# Altium footprint library WE-RJ45 LAN.PcbLib: 106 footprints (part 5 of 7)
Each footprint in its own frame and in the unit in brackets; x right, y up, seen from the top. Pads: shape width x height; smd on the part's side, far side on the other; paste and mask are expansions set on the pad; w line width, h text height; cw(c..) or ccw(c..) is an arc to the next point about the centre after c.
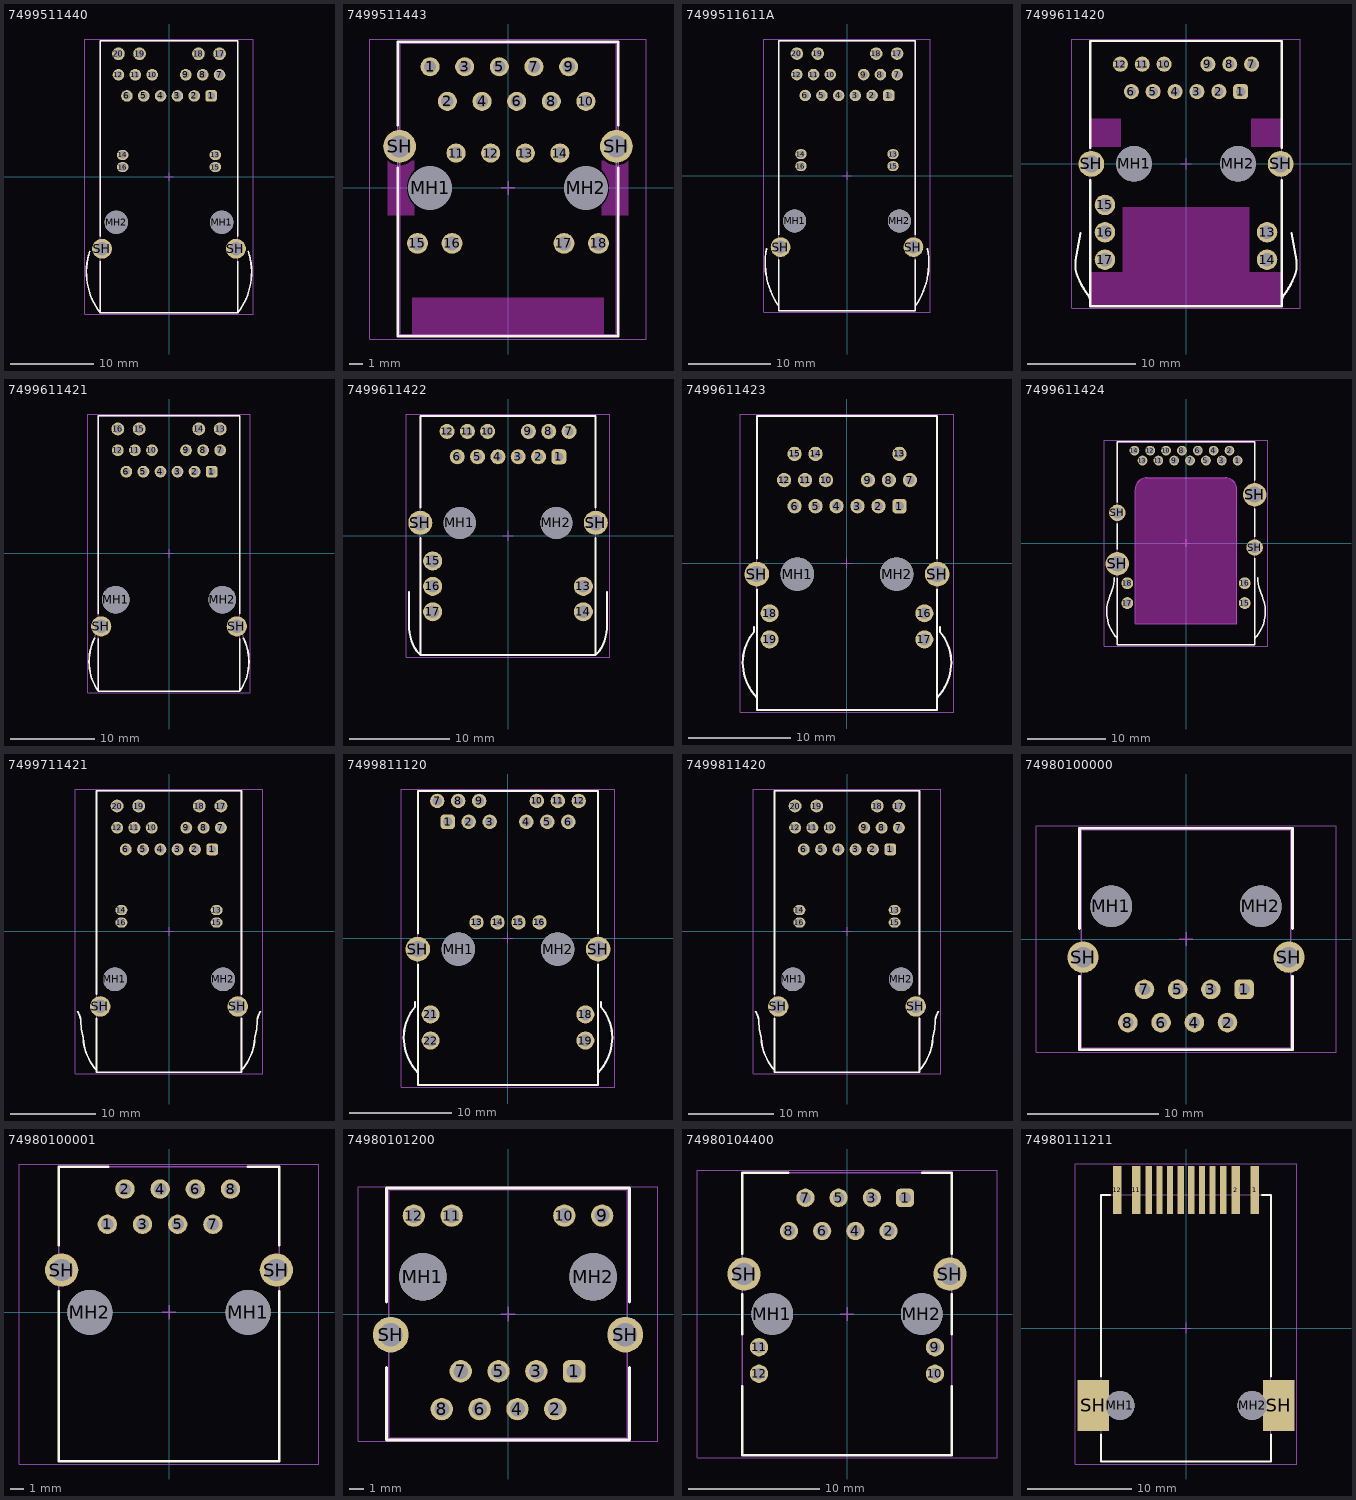
[diagram p4: the footprints below, top view; thin cyan lines are the x and y axes]

## 7499511440 [mm] "LAN Transformer, body 33.02x17mm"
height 13.87
pads (24):
  rrect50% 1.4x1.4 hole 0.9: 1(5.075,9.74)
  round 1.4 hole 0.9: 2(3.045,9.74) 3(1.015,9.74) 4(-1.015,9.74) 5(-3.045,9.74) 6(-5.075,9.74) 7(6.09,12.28) 8(4.06,12.28) 9(2.03,12.28) 10(-2.03,12.28) 11(-4.06,12.28) 12(-6.09,12.28)
  oval 1.4x1.2 hole 0.9: 13(5.59,2.62) 14(-5.59,2.62) 15(5.59,1.16) 16(-5.59,1.16)
  round 1.52 hole 1.03: 17(6.09,14.82) 18(3.55,14.82) 19(-3.55,14.82) 20(-6.09,14.82)
  round 2.8 hole 2.8 unplated: MH1(6.35,-5.5) MH2(-6.35,-5.5)
  round 2.4 hole 1.6: SH(-8.065,-8.68) SH(8.065,-8.68)
Top Overlay:
  lines w0.2: -9.557,-8.983 ccw(c-1.9,-11.5) -8.3,-16.4 ; -8.3,-10.2 -8.3,-16.4 ; -8.3,-7.16 -8.3,16.4 8.3,16.4 8.3,-7.16 ; 8.3,-10.2 8.3,-16.4 ; 9.557,-8.983 cw(c1.9,-11.5) 8.3,-16.4 ; -8.3,-16.4 8.3,-16.4
Top Assembly:
  lines w0.1: -9.557,-8.983 ccw(c-1.9,-11.5) -8.3,-16.4 ; 9.557,-8.983 cw(c1.9,-11.5) 8.3,-16.4 ; -8.3,-16.4 8.3,-16.4 ; -8.3,-16.4 -8.3,16.4 8.3,16.4 8.3,-16.4
Top Designator:
  text ".Designator" at -3.647,-0.357 h1
Top 3D Body:
  lines w0.1: -9.557,-8.983 ccw(c-1.9,-11.5) -8.3,-16.4 ; 9.557,-8.983 cw(c1.9,-11.5) 8.3,-16.4 ; -8.3,-16.4 8.3,-16.4 ; -8.3,-16.4 -8.3,16.4 8.3,16.4 8.3,-16.4
Top Courtyard:
  lines w0.05: -10.15,-16.6 -10.15,16.6 10.15,16.6 10.15,-16.6 -10.15,-16.6
Top Component Center:
  lines w0.1: -0.5,0 0.5,0 ; 0,-0.5 0,0.5
3D body "7499511440.stp": height 15.3, standoff -3.64, extent -9.95,-16.4 9.95,16.4

## 7499511443 [mm] "Integrated RJ45 Transformer, THT, body 15.90 x 21.35mm"
height 13.5
pads (22):
  round 1.4 hole 0.9: 1(-5.715,8.89) 2(-4.445,6.35) 3(-3.175,8.89) 4(-1.905,6.35) 5(-0.635,8.89) 6(0.635,6.35) 7(1.905,8.89) 8(3.175,6.35) 9(4.445,8.89) 10(5.715,6.35) 11(-3.81,2.56) 12(-1.27,2.56) 13(1.27,2.56) 14(3.81,2.56)
  round 1.53 hole 1.02: 15(-6.64,-4.06) 16(-4.1,-4.06) 17(4.1,-4.06) 18(6.64,-4.06)
  round 3.15 hole 3.25 unplated: MH1(-5.715,0) MH2(5.715,0)
  round 2.4 hole 1.6: SH(-7.95,3.05) SH(7.95,3.05)
Top Layer keep-out:
  region: 8.825,-2 8.825,2 8.735,1.918 8.533,1.784 8.309,1.691 8.071,1.644 7.829,1.644 7.591,1.691 7.367,1.784 7.165,1.918 7.075,2 6.875,2 6.875,1.35 7.001,1.211 7.209,0.9 7.352,0.554 7.425,0.187 7.425,-0.187 7.352,-0.554 7.209,-0.9 7.001,-1.211 6.875,-1.35 6.875,-2
  region: -8.825,-2 -8.825,2 -8.735,1.918 -8.533,1.784 -8.309,1.691 -8.071,1.644 -7.829,1.644 -7.591,1.691 -7.367,1.784 -7.165,1.918 -7.075,2 -6.875,2 -6.875,1.35 -7.001,1.211 -7.209,0.9 -7.352,0.554 -7.425,0.187 -7.425,-0.187 -7.352,-0.554 -7.209,-0.9 -7.001,-1.211 -6.875,-1.35 -6.875,-2
  region: -7.005,-10.75 7.005,-10.75 7.005,-8.05 -7.005,-8.05
Top Overlay:
  lines w0.2: -8.075,1.475 -8.075,-10.875 8.075,-10.875 8.075,1.475 ; -8.075,4.625 -8.075,10.725 8.075,10.725 8.075,4.625
Top Assembly:
  lines w0.1: -8.075,-10.875 8.075,-10.875 8.075,10.725 -8.075,10.725 -8.075,-10.875
Top Designator:
  text ".Designator" at -3.647,-0.357 h1
Top 3D Body:
  lines w0.1: -7.95,-10.75 -7.95,10.6 7.95,10.6 7.95,-10.75 -7.95,-10.75
Top Courtyard:
  lines w0.05: -10.151,-11.075 10.151,-11.075 10.151,10.925 -10.151,10.925 -10.151,-11.075
Top Component Center:
  lines w0.1: -0.5,0 0.5,0 ; 0,-0.5 0,0.5
3D body "7499511443.stp": height 15.65, standoff -3.78, extent -9.951,-11.001 9.951,10.6

## 7499511611A [mm] "LAN Transformer, body 33.02x17mm"
height 13.87
pads (24):
  rrect50% 1.4x1.4 hole 0.9: 1(5.075,9.74)
  round 1.4 hole 0.9: 2(3.045,9.74) 3(1.015,9.74) 4(-1.015,9.74) 5(-3.045,9.74) 6(-5.075,9.74) 7(6.09,12.28) 8(4.06,12.28) 9(2.03,12.28) 10(-2.03,12.28) 11(-4.06,12.28) 12(-6.09,12.28)
  oval 1.4x1.2 hole 0.9: 13(5.59,2.62) 14(-5.59,2.62) 15(5.59,1.16) 16(-5.59,1.16)
  round 1.52 hole 1.03: 17(6.09,14.82) 18(3.55,14.82) 19(-3.55,14.82) 20(-6.09,14.82)
  round 2.8 hole 2.8 unplated: MH1(-6.35,-5.5) MH2(6.35,-5.5)
  round 2.4 hole 1.6: SH(-8.065,-8.68) SH(8.065,-8.68)
Top Overlay:
  lines w0.2: -9.777,-8.886 ccw(c-0.7,-10.6) -8.3,-15.85 ; -8.3,-10.2 -8.3,-16.4 8.3,-16.4 8.3,-10.2 ; -8.3,-7.16 -8.3,16.4 8.3,16.4 8.3,-7.16 ; 8.3,-15.85 ccw(c0.7,-10.6) 9.777,-8.886
Top Assembly:
  lines w0.1: -9.777,-8.886 ccw(c-0.7,-10.6) -8.3,-15.85 ; 8.3,-15.85 ccw(c0.7,-10.6) 9.777,-8.886 ; -8.3,-16.4 -8.3,16.4 8.3,16.4 8.3,-16.4 -8.3,-16.4
Top Designator:
  text ".Designator" at -3.647,-0.357 h1
Top 3D Body:
  lines w0.1: -9.777,-8.886 ccw(c-0.7,-10.6) -8.3,-15.85 ; 8.3,-15.85 ccw(c0.7,-10.6) 9.777,-8.886 ; -8.3,-16.4 -8.3,16.4 8.3,16.4 8.3,-16.4 -8.3,-16.4
Top Courtyard:
  lines w0.05: -10.115,-16.6 10.115,-16.6 10.115,16.6 -10.115,16.6 -10.115,-16.6
Top Component Center:
  lines w0.1: -0.5,0 0.5,0 ; 0,-0.5 0,0.5
3D body "7499511611A.stp": height 15.25, standoff -3.79, extent -9.915,-16.4 9.915,16.4

## 7499611420 [mm] "10/100/1000/10G Base-T, THT, 1x1, Tab up, with shield tabs, with LED L-R yellow/green-green"
height 11.3
pads (21):
  rrect50% 1.4x1.4 hole 0.89: 1(5.075,6.71)
  round 1.4 hole 0.89: 2(3.045,6.71) 3(1.015,6.71) 4(-1.015,6.71) 5(-3.045,6.71) 6(-5.075,6.71) 7(6.09,9.25) 8(4.06,9.25) 9(2.03,9.25) 10(-2.03,9.25) 11(-4.06,9.25) 12(-6.09,9.25)
  round 1.9 hole 1.27: 13(7.52,-6.35) 14(7.52,-8.89) 15(-7.52,-3.81) 16(-7.52,-6.35) 17(-7.52,-8.89)
  round 3.3 hole 3.3 unplated: MH1(-4.825,0) MH2(4.825,0)
  round 2.4 hole 1.57: SH(-8.79,0) SH(8.79,0)
Top Overlay:
  lines w0.2: -9.803,-6.408 -10.253,-8.957 ccw(c-3.459,-9.443) -10.261,-9.802 ccw(c-3.781,-8.079) -9.271,-11.929 cw(c-10.549,-13.09) -8.89,-12.61 ; -8.89,-1.51 -8.89,-13.21 8.89,-13.21 8.89,-1.51 ; -8.89,1.49 -8.89,11.39 8.89,11.39 8.89,1.49 ; 8.89,-12.61 cw(c10.549,-13.09) 9.271,-11.929 ccw(c3.781,-8.079) 10.261,-9.802 ccw(c3.459,-9.443) 10.253,-8.957 9.803,-6.408
Keep-Out Layer:
  region: -5.88,-4.01 5.88,-4.01 5.88,-10.04 8.89,-10.04 8.89,-13.21 -8.89,-13.21 -8.89,-10.04 -5.88,-10.04
  region: -8.89,4.2 -6.075,4.2 -6.075,1.59 -8.89,1.59
  region: 8.89,4.2 6.075,4.2 6.075,1.59 8.89,1.59
Top Assembly:
  lines w0.1: -9.803,-6.408 -10.253,-8.957 ccw(c-3.459,-9.443) -10.261,-9.802 ccw(c-3.781,-8.079) -9.271,-11.929 cw(c-10.549,-13.09) -8.89,-12.61 ; 8.89,-12.61 cw(c10.549,-13.09) 9.271,-11.929 ccw(c3.781,-8.079) 10.261,-9.802 ccw(c3.459,-9.443) 10.253,-8.957 9.803,-6.408 ; -8.89,-13.21 -8.89,11.39 8.89,11.39 8.89,-13.21 -8.89,-13.21
Top Designator:
  text ".Designator" at -3.647,-0.357 h1
Top 3D Body:
  lines w0.1: -9.803,-6.408 -10.253,-8.957 ccw(c-3.459,-9.443) -10.261,-9.802 ccw(c-3.781,-8.079) -9.271,-11.929 cw(c-10.549,-13.09) -8.89,-12.61 ; 8.89,-12.61 cw(c10.549,-13.09) 9.271,-11.929 ccw(c3.781,-8.079) 10.261,-9.802 ccw(c3.459,-9.443) 10.253,-8.957 9.803,-6.408 ; -8.89,-13.21 -8.89,11.39 8.89,11.39 8.89,-13.21 -8.89,-13.21
Top Courtyard:
  lines w0.05: -10.587,-13.41 -10.587,11.59 10.587,11.59 10.587,-13.41 -10.587,-13.41
Top Component Center:
  lines w0.1: -0.5,0 0.5,0 ; 0,-0.5 0,0.5
3D body "7499611420.stp": height 12.85, standoff -3.25, extent -10.387,-13.21 10.387,11.39

## 7499611421 [mm] "10/100/1000/10G Base-T, THT, 1x1, Tab up, with shield tabs, with LED L-R yellow/green-green"
height 13.87
pads (20):
  rrect50% 1.4x1.4 hole 0.9: 1(5.075,9.73)
  round 1.4 hole 0.9: 2(3.045,9.73) 3(1.015,9.73) 4(-1.015,9.73) 5(-3.045,9.73) 6(-5.075,9.73) 7(6.09,12.27) 8(4.06,12.27) 9(2.03,12.27) 10(-2.03,12.27) 11(-4.06,12.27) 12(-6.09,12.27)
  round 1.53 hole 1.03: 13(6.09,14.81) 14(3.55,14.81) 15(-3.55,14.81) 16(-6.09,14.81)
  round 3.3 hole 3.3 unplated: MH1(-6.35,-5.51) MH2(6.35,-5.51)
  round 2.4 hole 1.6: SH(-8.065,-8.69) SH(8.065,-8.69)
Top Overlay:
  lines w0.2: -8.878,-10.135 ccw(c-3.287,-12.887) -8.435,-16.4 ; -8.435,-10.2 -8.435,-16.4 ; -8.435,-7.18 -8.435,16.4 8.435,16.4 8.435,-7.18 ; 8.435,-10.2 8.435,-16.4 ; 8.878,-10.135 cw(c3.287,-12.887) 8.435,-16.4 ; -8.435,-16.4 8.435,-16.4
Top Assembly:
  lines w0.1: -8.792,-9.075 cw(c-10.078,-9.504) -8.878,-10.135 ccw(c-3.287,-12.887) -8.435,-16.4 ; 8.792,-9.075 ccw(c10.078,-9.504) 8.878,-10.135 cw(c3.287,-12.887) 8.435,-16.4 ; -8.435,-16.4 -8.435,16.4 8.435,16.4 8.435,-16.4 ; -8.435,-16.4 8.435,-16.4
Top Designator:
  text ".Designator" at -3.647,-0.357 h1
Top 3D Body:
  lines w0.1: -8.792,-9.075 cw(c-10.078,-9.504) -8.878,-10.135 ccw(c-3.287,-12.887) -8.435,-16.4 ; 8.792,-9.075 ccw(c10.078,-9.504) 8.878,-10.135 cw(c3.287,-12.887) 8.435,-16.4 ; -8.435,-16.4 -8.435,16.4 8.435,16.4 8.435,-16.4 ; -8.435,-16.4 8.435,-16.4
Top Courtyard:
  lines w0.05: -9.7,-16.6 -9.7,16.59 9.7,16.59 9.7,-16.6 -9.7,-16.6
Top Component Center:
  lines w0.1: -0.5,0 0.5,0 ; 0,-0.5 0,0.5
3D body "7499611421.stp": height 15, standoff -3.3, extent -9.5,-16.4 9.5,16.4

## 7499611422 [mm] "10/100/1000/10G Base-T, THT, 1x1, Tab down, with shield tabs, with LED L-R yellow/green-green"
height 11.3
pads (21):
  rrect50% 1.5x1.5 hole 0.89: 1(5.08,7.87)
  round 1.5 hole 0.89: 2(3.05,7.87) 3(1.02,7.87) 4(-1.01,7.87) 5(-3.04,7.87) 6(-5.07,7.87) 7(6.1,10.41) 8(4.07,10.41) 9(2.04,10.41) 10(-2.03,10.41) 11(-4.06,10.41) 12(-6.09,10.41)
  round 1.9 hole 1.27: 13(7.525,-5.08) 14(7.525,-7.62) 15(-7.525,-2.54) 16(-7.525,-5.08) 17(-7.525,-7.62)
  round 3.2 hole 3.2 unplated: MH1(-4.82,1.27) MH2(4.83,1.27)
  round 2.4 hole 1.57: SH(-8.76,1.27) SH(8.77,1.27)
Top Overlay:
  lines w0.2: -9.893,-5.63 -9.893,-8.873 ccw(c-0.53,-8.455) -9.754,-10.12 ccw(c-6.826,-9.484) -9.537,-10.758 ccw(c-6.85,-9.827) -8.765,-11.93 ; -8.765,-0.26 -8.765,-11.94 8.765,-11.94 8.765,-0.26 ; -8.765,2.8 -8.765,11.94 8.765,11.94 8.765,2.8 ; 8.765,-11.93 ccw(c6.85,-9.827) 9.537,-10.758 ccw(c6.826,-9.484) 9.754,-10.12 ccw(c0.53,-8.455) 9.893,-8.873 9.893,-5.63
Top Assembly:
  lines w0.1: -9.893,-5.63 -9.893,-8.873 ccw(c-0.53,-8.455) -9.754,-10.12 ccw(c-6.826,-9.484) -9.537,-10.758 ccw(c-6.85,-9.827) -8.765,-11.93 ; 8.765,-11.93 ccw(c6.85,-9.827) 9.537,-10.758 ccw(c6.826,-9.484) 9.754,-10.12 ccw(c0.53,-8.455) 9.893,-8.873 9.893,-5.63 ; -8.765,-11.94 8.765,-11.94 8.765,11.94 -8.765,11.94 -8.765,-11.94
Top Designator:
  text ".Designator" at -3.647,-0.357 h1
Top 3D Body:
  lines w0.1: -9.893,-5.63 -9.893,-8.873 ccw(c-0.53,-8.455) -9.754,-10.12 ccw(c-6.826,-9.484) -9.537,-10.758 ccw(c-6.85,-9.827) -8.765,-11.93 ; 8.765,-11.93 ccw(c6.85,-9.827) 9.537,-10.758 ccw(c6.826,-9.484) 9.754,-10.12 ccw(c0.53,-8.455) 9.893,-8.873 9.893,-5.63 ; -8.765,-11.94 8.765,-11.94 8.765,11.94 -8.765,11.94 -8.765,-11.94
Top Courtyard:
  lines w0.05: -10.16,-12.14 10.16,-12.14 10.16,12.14 -10.16,12.14 -10.16,-12.14
Top Component Center:
  lines w0.1: -0.5,0 0.5,0 ; 0,-0.5 0,0.5
3D body "7499611422.stp": height 12.5, standoff -3.2, extent -9.965,-11.94 9.965,11.94

## 7499611423 [mm] "10/100/1000/10G Base-T, THT, 1x1, Tab down, with shield tabs, with LED L/R yellow-green/green, ETR"
height 11.92
pads (23):
  rrect50% 1.4x1.4 hole 0.9: 1(5.1,5.525)
  round 1.4 hole 0.9: 2(3.06,5.525) 3(1.02,5.525) 4(-1.02,5.525) 5(-3.06,5.525) 6(-5.1,5.525) 7(6.12,8.065) 8(4.08,8.065) 9(2.04,8.065) 10(-2.04,8.065) 11(-4.08,8.065) 12(-6.12,8.065) 13(5.1,10.605) 14(-3.06,10.605) 15(-5.1,10.605)
  round 1.75 hole 1.14: 16(7.52,-4.885) 17(7.52,-7.425) 18(-7.52,-4.885) 19(-7.52,-7.425)
  round 3.25 hole 3.25 unplated: MH1(-4.825,-1.075) MH2(4.825,-1.075)
  round 2.4 hole 1.57: SH(-8.765,-1.075) SH(8.765,-1.075)
Top Overlay:
  lines w0.2: -9.024,-6.204 -9.024,-6.677 ccw(c-5.614,-9.65) -10.075,-10.404 ccw(c-5.089,-9.628) -8.765,-13.085 ; -8.765,-2.6 -8.765,-14.285 8.765,-14.285 8.765,-2.6 ; -8.765,0.45 -8.765,14.285 8.765,14.285 8.765,0.45 ; 8.765,-13.085 ccw(c5.089,-9.628) 10.075,-10.404 ccw(c5.614,-9.65) 9.024,-6.677 9.024,-6.204
Top Assembly:
  lines w0.1: -9.024,-6.204 -9.024,-6.677 ccw(c-5.614,-9.65) -10.075,-10.404 ccw(c-5.089,-9.628) -8.765,-13.085 ; 8.765,-13.085 ccw(c5.089,-9.628) 10.075,-10.404 ccw(c5.614,-9.65) 9.024,-6.677 9.024,-6.204 ; -8.765,-14.285 -8.765,14.285 8.765,14.285 8.765,-14.285 -8.765,-14.285
Top Designator:
  text ".Designator" at -3.647,-0.357 h1
Top 3D Body:
  lines w0.1: -9.024,-6.204 -9.024,-6.677 ccw(c-5.614,-9.65) -10.075,-10.404 ccw(c-5.089,-9.628) -8.765,-13.085 ; 8.765,-13.085 ccw(c5.089,-9.628) 10.075,-10.404 ccw(c5.614,-9.65) 9.024,-6.677 9.024,-6.204 ; -8.765,-14.285 -8.765,14.285 8.765,14.285 8.765,-14.285 -8.765,-14.285
Top Courtyard:
  lines w0.05: -10.363,-14.485 -10.363,14.485 10.363,14.485 10.363,-14.485 -10.363,-14.485
Top Component Center:
  lines w0.1: -0.5,0 0.5,0 ; 0,-0.5 0,0.5
3D body "7499611423.stp": height 13.4, standoff -3.73, extent -10.163,-14.285 10.163,14.285

## 7499611424 [mm] "10/100/1000/10G Base-T, THT, 1x1, Tab up, with shield tabs, with LED L/R yellow-green/green, sink type, ETR"
height 11.3
pads (22):
  round 1.25 hole 0.91: 1(6.61,10.57) 2(5.57,11.84) 3(4.58,10.57) 4(3.54,11.84) 5(2.55,10.57) 6(1.51,11.84) 7(0.52,10.57) 8(-0.52,11.84) 9(-1.51,10.57) 10(-2.55,11.84) 11(-3.54,10.57) 12(-4.58,11.84) 13(-5.57,10.57) 14(-6.61,11.84)
  round 1.52 hole 1.02: 15(7.52,-7.67) 16(7.52,-5.13) 17(-7.52,-7.67) 18(-7.52,-5.13)
  round 3 hole 2.03: SH(-8.79,-2.64) SH(8.79,6.21)
  round 2.1 hole 1.4: SH(-8.79,3.88) SH(8.79,-0.56)
Top Overlay:
  lines w0.2: -9.166,-4.434 cw(c-14.185,-4.348) -9.562,-6.303 ccw(c-1.44,-9.726) -9.901,-7.256 ccw(c-5.639,-8.775) -10.1,-9.529 ccw(c-5.114,-8.753) -8.79,-12.21 ; -8.79,-4.5 -8.79,-13 8.79,-13 8.79,-1.95 ; -8.79,-0.78 -8.79,2.5 ; -8.79,5.26 -8.79,13 8.79,13 8.79,8.05 ; 8.79,-12.21 ccw(c5.114,-8.753) 10.1,-9.529 ccw(c5.639,-8.775) 9.901,-7.256 ccw(c1.44,-9.726) 9.562,-6.303 cw(c14.185,-4.348) 9.166,-4.434 ; 8.79,0.85 8.79,4.37
Keep-Out Layer:
  board cut-out: -6.5,-10.32 -6.5,6.89 -6.5,7.038 -6.442,7.328 -6.329,7.601 -6.165,7.846 -5.956,8.055 -5.711,8.219 -5.438,8.332 -5.148,8.39 -5,8.39 5,8.39 5.148,8.39 5.438,8.332 5.711,8.219 5.956,8.055 6.165,7.846 6.329,7.601 6.442,7.328 6.5,7.038 6.5,6.89 6.5,-10.32
Board Shape:
  lines w0.1: -6.5,-10.32 6.5,-10.32 6.5,6.89 ccw(c5,6.89) 5,8.39 -5,8.39 ccw(c-5,6.89) -6.5,6.89 -6.5,-10.32
  text "board cut out area" at -4.75,-2.665 h0.8
Top Assembly:
  lines w0.1: -9.166,-4.434 cw(c-14.185,-4.348) -9.562,-6.303 ccw(c-1.44,-9.726) -9.901,-7.256 ccw(c-5.639,-8.775) -10.1,-9.529 ccw(c-5.114,-8.753) -8.79,-12.21 ; 8.79,-12.21 ccw(c5.114,-8.753) 10.1,-9.529 ccw(c5.639,-8.775) 9.901,-7.256 ccw(c1.44,-9.726) 9.562,-6.303 cw(c14.185,-4.348) 9.166,-4.434 ; -8.79,-13 -8.79,13 8.79,13 8.79,-13 -8.79,-13
Top Designator:
  text ".Designator" at -3.647,-0.357 h1
Top 3D Body:
  lines w0.1: -9.166,-4.434 cw(c-14.185,-4.348) -9.562,-6.303 ccw(c-1.44,-9.726) -9.901,-7.256 ccw(c-5.639,-8.775) -10.1,-9.529 ccw(c-5.114,-8.753) -8.79,-12.21 ; 8.79,-12.21 ccw(c5.114,-8.753) 10.1,-9.529 ccw(c5.639,-8.775) 9.901,-7.256 ccw(c1.44,-9.726) 9.562,-6.303 cw(c14.185,-4.348) 9.166,-4.434 ; -8.79,-13 -8.79,13 8.79,13 8.79,-13 -8.79,-13
Top Courtyard:
  lines w0.05: -10.49,-13.2 -10.49,13.2 10.49,13.2 10.49,-13.2 -10.49,-13.2
Top Component Center:
  lines w0.1: -0.5,0 0.5,0 ; 0,-0.5 0,0.5
3D body "7499611424.stp": height 10.27, standoff -3.22, extent -10.189,-13.06 10.189,13.04

## 7499711421 [mm] "10/100/1000/10G Base-T, PoE, THT, 1x1, Tab up, with shield tabs, with LED L-R yellow/green-green, ETR"
height 13.87
pads (24):
  rrect50% 1.4x1.4 hole 0.89: 1(5.075,9.63)
  round 1.4 hole 0.89: 2(3.045,9.63) 3(1.015,9.63) 4(-1.015,9.63) 5(-3.045,9.63) 6(-5.075,9.63) 7(6.09,12.17) 8(4.06,12.17) 9(2.03,12.17) 10(-2.03,12.17) 11(-4.06,12.17) 12(-6.09,12.17)
  oval 1.4x1.2 hole 0.89: 13(5.59,2.51) 14(-5.59,2.51) 15(5.59,1.05) 16(-5.59,1.05)
  round 1.5 hole 1.02: 17(6.09,14.71) 18(3.555,14.71) 19(-3.555,14.71) 20(-6.09,14.71)
  round 2.8 hole 2.8 unplated: MH1(-6.35,-5.61) MH2(6.35,-5.61)
  round 2.4 hole 1.57: SH(-8.065,-8.79) SH(8.065,-8.79)
Top Overlay:
  lines w0.2: -10.72,-9.424 cw(c-12.105,-10.49) -10.36,-10.589 ; -10.357,-10.486 -10.281,-11.433 -10.067,-12.498 ccw(c-3.705,-12.1) -8.5,-16.3 ; -8.5,-10.21 -8.5,-16.51 8.5,-16.51 8.5,-10.21 ; -8.5,-7.36 -8.5,16.51 8.5,16.51 8.5,-7.36 ; 8.5,-16.3 ccw(c3.705,-12.1) 10.067,-12.498 10.281,-11.433 10.357,-10.486 ; 10.36,-10.589 cw(c12.105,-10.49) 10.72,-9.424
Top Assembly:
  lines w0.1: -10.72,-9.424 cw(c-12.105,-10.49) -10.36,-10.589 ; -10.357,-10.486 -10.281,-11.433 -10.067,-12.498 ccw(c-3.705,-12.1) -8.5,-16.3 ; 8.5,-16.3 ccw(c3.705,-12.1) 10.067,-12.498 10.281,-11.433 10.357,-10.486 ; 10.36,-10.589 cw(c12.105,-10.49) 10.72,-9.424 ; -8.5,-16.51 8.5,-16.51 8.5,16.51 -8.5,16.51 -8.5,-16.51
Top Designator:
  text ".Designator" at -3.647,-0.357 h1
Top 3D Body:
  lines w0.1: -10.72,-9.424 cw(c-12.105,-10.49) -10.36,-10.589 ; -10.357,-10.486 -10.281,-11.433 -10.067,-12.498 ccw(c-3.705,-12.1) -8.5,-16.3 ; 8.5,-16.3 ccw(c3.705,-12.1) 10.067,-12.498 10.281,-11.433 10.357,-10.486 ; 10.36,-10.589 cw(c12.105,-10.49) 10.72,-9.424 ; -8.5,-16.51 8.5,-16.51 8.5,16.51 -8.5,16.51 -8.5,-16.51
Top Courtyard:
  lines w0.05: -11,-16.71 11,-16.71 11,16.71 -11,16.71 -11,-16.71
Top Component Center:
  lines w0.1: -0.5,0 0.5,0 ; 0,-0.5 0,0.5
3D body "7499711421.stp": height 16.24, standoff -3.61, extent -10.8,-16.51 10.8,16.51

## 7499811120 [mm] "10/100/1000/10G Base-T, PoE+, THT, 1x1, Tab down, with shield tabs, with LED L-R yellow-green, ETR, PoE+"
height 11.92
pads (24):
  rrect50% 1.4x1.4 hole 0.89: 1(-5.86,11.295)
  round 1.4 hole 0.89: 2(-3.82,11.295) 3(-1.78,11.295) 4(1.78,11.295) 5(3.82,11.295) 6(5.86,11.295) 7(-6.88,13.325) 8(-4.84,13.325) 9(-2.8,13.325) 10(2.8,13.325) 11(4.84,13.325) 12(6.88,13.325) 13(-3.06,1.525) 14(-1.02,1.525) 15(1.02,1.525) 16(3.06,1.525)
  round 1.75 hole 1.14: 18(7.52,-7.425) 19(7.52,-9.965) 21(-7.52,-7.425) 22(-7.52,-9.965)
  round 3.25 hole 3.25 unplated: MH1(-4.825,-1.075) MH2(4.825,-1.075)
  round 2.4 hole 1.57: SH(-8.765,-1.075) SH(8.765,-1.075)
Top Overlay:
  lines w0.2: -9.024,-6.204 -9.024,-6.677 ccw(c-5.614,-9.65) -10.075,-10.404 ccw(c-5.089,-9.628) -8.765,-13.085 ; -8.765,-2.6 -8.765,-14.285 8.765,-14.285 8.765,-2.6 ; -8.765,0.45 -8.765,14.285 8.765,14.285 8.765,0.45 ; 8.765,-13.085 ccw(c5.089,-9.628) 10.075,-10.404 ccw(c5.614,-9.65) 9.024,-6.677 9.024,-6.204
Top Assembly:
  lines w0.1: -9.024,-6.204 -9.024,-6.677 ccw(c-5.614,-9.65) -10.075,-10.404 ccw(c-5.089,-9.628) -8.765,-13.085 ; 8.765,-13.085 ccw(c5.089,-9.628) 10.075,-10.404 ccw(c5.614,-9.65) 9.024,-6.677 9.024,-6.204 ; -8.765,-14.285 8.765,-14.285 8.765,14.285 -8.765,14.285 -8.765,-14.285
Top Designator:
  text ".Designator" at -3.647,-0.357 h1
Top 3D Body:
  lines w0.1: -9.024,-6.204 -9.024,-6.677 ccw(c-5.614,-9.65) -10.075,-10.404 ccw(c-5.089,-9.628) -8.765,-13.085 ; 8.765,-13.085 ccw(c5.089,-9.628) 10.075,-10.404 ccw(c5.614,-9.65) 9.024,-6.677 9.024,-6.204 ; -8.765,-14.285 8.765,-14.285 8.765,14.285 -8.765,14.285 -8.765,-14.285
Top Courtyard:
  lines w0.05: -10.363,-14.485 -10.363,14.485 10.363,14.485 10.363,-14.485 -10.363,-14.485
Top Component Center:
  lines w0.1: -0.5,0 0.5,0 ; 0,-0.5 0,0.5
3D body "7499811120.stp": height 13.37, standoff -3.75, extent -10.163,-14.285 10.163,14.285

## 7499811420 [mm] "10/100/1000/10G Base-T, PoE+, THT, 1x1, Tab up, with shield tabs, with LED L-R yellow/green-green, ETR"
height 13.87
pads (24):
  rrect50% 1.4x1.4 hole 0.89: 1(5.075,9.63)
  round 1.4 hole 0.89: 2(3.045,9.63) 3(1.015,9.63) 4(-1.015,9.63) 5(-3.045,9.63) 6(-5.075,9.63) 7(6.09,12.17) 8(4.06,12.17) 9(2.03,12.17) 10(-2.03,12.17) 11(-4.06,12.17) 12(-6.09,12.17)
  oval 1.4x1.2 hole 0.89: 13(5.59,2.51) 14(-5.59,2.51) 15(5.59,1.05) 16(-5.59,1.05)
  round 1.5 hole 1.02: 17(6.09,14.71) 18(3.555,14.71) 19(-3.555,14.71) 20(-6.09,14.71)
  round 2.8 hole 2.8 unplated: MH1(-6.35,-5.61) MH2(6.35,-5.61)
  round 2.4 hole 1.57: SH(-8.065,-8.79) SH(8.065,-8.79)
Top Overlay:
  lines w0.2: -10.72,-9.424 cw(c-12.105,-10.49) -10.36,-10.589 ; -10.357,-10.486 -10.281,-11.433 -10.067,-12.498 ccw(c-3.705,-12.1) -8.5,-16.3 ; -8.5,-10.21 -8.5,-16.51 8.5,-16.51 8.5,-10.21 ; -8.5,-7.36 -8.5,16.51 8.5,16.51 8.5,-7.36 ; 8.5,-16.3 ccw(c3.705,-12.1) 10.067,-12.498 10.281,-11.433 10.357,-10.486 ; 10.36,-10.589 cw(c12.105,-10.49) 10.72,-9.424
Top Assembly:
  lines w0.1: -10.72,-9.424 cw(c-12.105,-10.49) -10.36,-10.589 ; -10.357,-10.486 -10.281,-11.433 -10.067,-12.498 ccw(c-3.705,-12.1) -8.5,-16.3 ; 8.5,-16.3 ccw(c3.705,-12.1) 10.067,-12.498 10.281,-11.433 10.357,-10.486 ; 10.36,-10.589 cw(c12.105,-10.49) 10.72,-9.424 ; -8.5,-16.51 8.5,-16.51 8.5,16.51 -8.5,16.51 -8.5,-16.51
Top Designator:
  text ".Designator" at -3.647,-0.357 h1
Top 3D Body:
  lines w0.1: -10.72,-9.424 cw(c-12.105,-10.49) -10.36,-10.589 ; -10.357,-10.486 -10.281,-11.433 -10.067,-12.498 ccw(c-3.705,-12.1) -8.5,-16.3 ; 8.5,-16.3 ccw(c3.705,-12.1) 10.067,-12.498 10.281,-11.433 10.357,-10.486 ; 10.36,-10.589 cw(c12.105,-10.49) 10.72,-9.424 ; -8.5,-16.51 8.5,-16.51 8.5,16.51 -8.5,16.51 -8.5,-16.51
Top Courtyard:
  lines w0.05: -11,-16.71 11,-16.71 11,16.71 -11,16.71 -11,-16.71
Top Component Center:
  lines w0.1: -0.5,0 0.5,0 ; 0,-0.5 0,0.5
3D body "7499711421.stp": height 16.24, standoff -3.61, extent -10.8,-16.51 10.8,16.51

## 74980100000 [mm] "LAN Transformer Through Hole Reflow, body 16.05x16.7mm"
height 16.9
pads (12):
  rrect50% 1.5x1.5 hole 0.89: 1(4.445,-3.85)
  round 1.5 hole 0.89: 2(3.175,-6.39) 3(1.905,-3.85) 4(0.635,-6.39) 5(-0.635,-3.85) 6(-1.905,-6.39) 7(-3.175,-3.85) 8(-4.445,-6.39)
  round 3.2 hole 3.2 unplated: MH1(-5.715,2.5) MH2(5.715,2.5)
  round 2.4 hole 1.57: SH(-7.875,-1.39) SH(7.875,-1.39)
Top Overlay:
  lines w0.2: -8.15,-2.85 -8.15,-8.475 8.15,-8.475 8.15,-2.85 ; -8.15,0.8 -8.15,8.475 8.15,8.475 8.15,0.8
Top Paste:
  region: 2.03,-5.45 4.23,-5.45 4.23,-8.05 2.03,-8.05
  region: -0.51,-5.45 1.69,-5.45 1.69,-8.05 -0.51,-8.05
  region: -3.05,-5.45 -0.85,-5.45 -0.85,-8.05 -3.05,-8.05
  region: -5.59,-5.45 -3.39,-5.45 -3.39,-8.05 -5.59,-8.05
  region: -2.03,-2.55 -4.23,-2.55 -4.23,-5.15 -2.03,-5.15
  region: 0.51,-2.55 -1.69,-2.55 -1.69,-5.15 0.51,-5.15
  region: 3.05,-2.55 0.85,-2.55 0.85,-5.15 3.05,-5.15
  region: 5.59,-2.55 3.39,-2.55 3.39,-5.15 5.59,-5.15
  region: 4.475,0.61 11.275,0.61 11.275,-1.99 4.475,-1.99
  region: -11.275,0.61 -4.475,0.61 -4.475,-1.99 -11.275,-1.99
Top Assembly:
  lines w0.1: -8.025,-8.35 8.025,-8.35 8.025,8.35 -8.025,8.35 -8.025,-8.35
Top Designator:
  text ".Designator" at -3.647,-0.357 h1
Top 3D Body:
  lines w0.1: -8.025,-8.35 8.025,-8.35 8.025,8.35 -8.025,8.35 -8.025,-8.35
Top Courtyard:
  lines w0.05: -11.475,-8.675 -11.475,8.675 11.475,8.675 11.475,-8.675 -11.475,-8.675
Top Component Center:
  lines w0.1: -0.5,0 0.5,0 ; 0,-0.5 0,0.5
3D body "74980100000.stp": height 16.95, standoff -2.15, extent -8.225,-8.35 8.225,8.35

## 74980100001 [mm] "RJ45 Transformer THR, body 15.90 x 21.25mm"
height 13.5
pads (12):
  round 1.4 hole 0.9: 1(-4.45,6.35) 2(-3.18,8.89) 3(-1.91,6.35) 4(-0.64,8.89) 5(0.63,6.35) 6(1.9,8.89) 7(3.17,6.35) 8(4.44,8.89)
  round 3.25 hole 3.25 unplated: MH1(5.715,0) MH2(-5.715,0)
  round 2.4 hole 1.6: SH(-7.745,3.05) SH(7.745,3.05)
Top Overlay:
  lines w0.2: -7.95,1.5 -7.95,-10.75 7.95,-10.75 7.95,1.5 ; -7.95,4.85 -7.95,10.5 -4.4,10.5 ; 5.7,10.5 7.95,10.5 7.95,4.85
Top Paste:
  region: -4.895,4.6 -10.595,4.6 -10.595,1.8 -4.895,1.8
  rectangle: 4.895,1.8 10.595,4.6
  rectangle: 3.445,7.89 5.445,10.49
  rectangle: 0.905,7.89 2.905,10.49
  rectangle: -1.635,7.89 0.365,10.49
  rectangle: -4.175,7.89 -2.175,10.49
  rectangle: 2.175,4.95 4.175,7.55
  rectangle: -0.365,4.95 1.635,7.55
  rectangle: -2.905,4.95 -0.905,7.55
  rectangle: -5.445,4.95 -3.445,7.55
Top Assembly:
  lines w0.1: -7.95,-10.75 7.95,-10.75 7.95,10.5 -7.95,10.5 -7.95,-10.75
Top Designator:
  text ".Designator" at -3.647,-0.357 h1
Top 3D Body:
  lines w0.1: -7.95,-10.75 7.95,-10.75 7.95,10.5 -7.95,10.5 -7.95,-10.75
Top Courtyard:
  lines w0.05: -10.795,-10.95 -10.795,10.7 10.795,10.7 10.795,-10.95 -10.795,-10.95
Top Component Center:
  lines w0.1: -0.5,0 0.5,0 ; 0,-0.5 0,0.5
3D body "74980100001.stp": height 14.55, standoff -2.38, extent -8.01,-10.75 8.01,10.5

## 74980101200 [mm] "LAN Transformer Through Hole Reflow, body 16.05x16.7mm"
height 16.9
pads (16):
  rrect50% 1.5x1.5 hole 1 paste-2539.97: 1(4.445,-3.85)
  round 1.5 hole 1 paste-2539.97: 2(3.175,-6.39) 3(1.905,-3.85) 4(0.635,-6.39) 5(-0.635,-3.85) 6(-1.905,-6.39) 7(-3.175,-3.85) 8(-4.445,-6.39) 9(6.325,6.61) 10(3.785,6.61) 11(-3.785,6.61) 12(-6.325,6.61)
  round 3.2 hole 3.2 unplated paste-2539.97: MH1(-5.715,2.5) MH2(5.715,2.5)
  round 2.4 hole 1.57 paste-2539.97: SH(-7.875,-1.39) SH(7.875,-1.39)
Top Overlay:
  lines w0.2: -8.15,-3.6 -8.15,-8.475 8.15,-8.475 8.15,-3.6 ; -8.15,0.8 -8.15,8.475 8.15,8.475 8.15,0.8
Top Paste:
  region: -7.165,7.91 -4.965,7.91 -4.965,5.31 -7.165,5.31
  region: -4.625,7.91 -2.425,7.91 -2.425,5.31 -4.625,5.31
  region: 5.485,5.31 7.685,5.31 7.685,7.91 5.485,7.91
  region: -4.32,-2.55 -2.03,-2.55 -2.03,-5.15 -4.32,-5.15
  region: -1.78,-2.55 0.51,-2.55 0.51,-5.15 -1.78,-5.15
  region: 0.76,-2.55 3.05,-2.55 3.05,-5.15 0.76,-5.15
  region: -3.05,-5.45 -0.76,-5.45 -0.76,-8.05 -3.05,-8.05
  region: -0.51,-5.45 1.78,-5.45 1.78,-8.05 -0.51,-8.05
  region: 2.03,-5.45 4.32,-5.45 4.32,-8.05 2.03,-8.05
  region: -5.59,-5.45 -3.3,-5.45 -3.3,-8.05 -5.59,-8.05
  region: 3.3,-2.55 5.59,-2.55 5.59,-5.15 3.3,-5.15
  region: 9.875,0.61 5.875,0.61 5.875,-3.39 9.875,-3.39
  region: -9.875,0.61 -5.875,0.61 -5.875,-3.39 -9.875,-3.39
  region: 2.945,5.31 5.145,5.31 5.145,7.91 2.945,7.91
Top Assembly:
  lines w0.1: -8.025,-8.35 -8.025,8.35 8.025,8.35 8.025,-8.35 -8.025,-8.35
Top Designator:
  text ".Designator" at -3.647,-0.357 h1
Top 3D Body:
  lines w0.1: -8.025,-8.35 -8.025,8.35 8.025,8.35 8.025,-8.35 -8.025,-8.35
Top Courtyard:
  lines w0.05: -10.075,-8.55 10.075,-8.55 10.075,8.55 -10.075,8.55 -10.075,-8.55
Top Component Center:
  lines w0.1: -0.5,0 0.5,0 ; 0,-0.5 0,0.5
3D body "74980101200.stp": height 16.95, standoff -2.15, extent -8.225,-8.35 8.225,8.35

## 74980104400 [mm] "10/100Base-T, THT, 1x1, Tab up, w/o shield tabs, LED L-R yellow-green/yellow-green, THR"
height 13.85
pads (16):
  rrect50% 1.4x1.4 hole 0.89: 1(4.44,8.89)
  round 1.4 hole 0.89: 2(3.18,6.35) 3(1.9,8.89) 4(0.64,6.35) 5(-0.64,8.89) 6(-1.9,6.35) 7(-3.18,8.89) 8(-4.44,6.35) 9(6.725,-2.54) 10(6.725,-4.57) 11(-6.725,-2.54) 12(-6.725,-4.57)
  round 3.2 hole 3.2 unplated: MH1(-5.715,0) MH2(5.715,0)
  round 2.55 hole 1.7: SH(-7.875,3.05) SH(7.875,3.05)
Top Overlay:
  lines w0.2: -8,-5.55 -8,-10.8 8,-10.8 8,-5.55 ; -8,-1.56 -8,1.5 ; -8,4.6 -8,10.8 -4.5,10.8 ; 5.75,10.8 8,10.8 8,4.6 ; 8,-1.56 8,1.5
Top Paste:
  region: -3.33,7.45 -5.53,7.45 -5.53,4.65 -3.33,4.65
  region: -0.79,7.45 -2.99,7.45 -2.99,4.65 -0.79,4.65
  region: 1.75,7.45 -0.45,7.45 -0.45,4.65 1.75,4.65
  region: 4.29,7.45 2.09,7.45 2.09,4.65 4.29,4.65
  region: -2.07,7.79 -4.27,7.79 -4.27,10.59 -2.07,10.59
  region: 5.55,7.79 3.35,7.79 3.35,10.59 5.55,10.59
  region: 3.01,7.79 0.81,7.79 0.81,10.59 3.01,10.59
  region: 0.47,7.79 -1.73,7.79 -1.73,10.59 0.47,10.59
  region: -4.475,1.75 -11.275,1.75 -11.275,4.35 -4.475,4.35
  region: 11.275,1.75 4.475,1.75 4.475,4.35 11.275,4.35
  region: -8.625,-3.34 -4.825,-3.34 -4.825,-1.74 -8.625,-1.74
  region: 8.625,-3.34 4.825,-3.34 4.825,-1.74 8.625,-1.74
  region: -8.625,-5.37 -4.825,-5.37 -4.825,-3.77 -8.625,-3.77
  region: 8.625,-5.37 4.825,-5.37 4.825,-3.77 8.625,-3.77
Assembly Notes:
  text "The stencil layout appplied for / PCB 1.6mm and Stencil 0.15mm" at -4.85,-13.15 h0.5
Top Assembly:
  lines w0.1: -8,-10.8 -8,10.8 8,10.8 8,-10.8 -8,-10.8
Top Designator:
  text ".Designator" at -3.647,-0.357 h1
Top 3D Body:
  lines w0.1: -8,-10.8 -8,10.8 8,10.8 8,-10.8 -8,-10.8
Top Courtyard:
  lines w0.05: -11.475,-11 -11.475,11 11.475,11 11.475,-11 -11.475,-11
Top Component Center:
  lines w0.1: -0.5,0 0.5,0 ; 0,-0.5 0,0.5
3D body "74980104400.stp": height 13.83, standoff -2.7, extent -8.15,-10.8 8.15,10.8

## 74980111211 [mm] "LAN Transformer, body 25.4x16.1mm"
height 13.61
pads (16):
  rect 0.81x4.6 smd: 1(6.61,13.27) 2(4.77,13.27) 11(-4.77,13.27) 12(-6.61,13.27)
  rect 0.61x4.6 smd: 3(3.57,13.27) 4(2.55,13.27) 5(1.53,13.27) 6(0.51,13.27) 7(-0.51,13.27) 8(-1.53,13.27) 9(-2.55,13.27) 10(-3.57,13.27)
  round 2.8 hole 2.8 unplated: MH1(-6.35,-7.42) MH2(6.35,-7.42)
  rect 3x4.9 smd: SH(-8.92,-7.42) SH(8.92,-7.42)
Top Overlay:
  lines w0.2: -8.15,-10.2 -8.15,-12.8 8.15,-12.8 8.15,-10.2 ; -8.15,-4.65 -8.15,12.8 -7.3,12.8 ; 7.3,12.8 8.15,12.8 8.15,-4.65
Top Assembly:
  lines w0.1: -8.15,-12.8 -8.15,12.8 8.15,12.8 8.15,-12.8 -8.15,-12.8
Top Designator:
  text ".Designator" at -3.647,-0.357 h1
Top 3D Body:
  lines w0.1: -8.15,-12.8 8.15,-12.8 8.15,12.8 -8.15,12.8 -8.15,-12.8
Top Courtyard:
  lines w0.05: -10.62,-13.05 10.62,-13.05 10.62,15.77 -10.62,15.77 -10.62,-13.05
Top Component Center:
  lines w0.1: -0.5,0 0.5,0 ; 0,-0.5 0,0.5
3D body "74980111211.stp": height 14.96, standoff -0.98, extent -9.45,-12.7 9.45,14.156